# Altium integrated library conn-USB.IntLib: 68 symbols
Pins are listed as number, name and electrical type; pins without a type are passive.

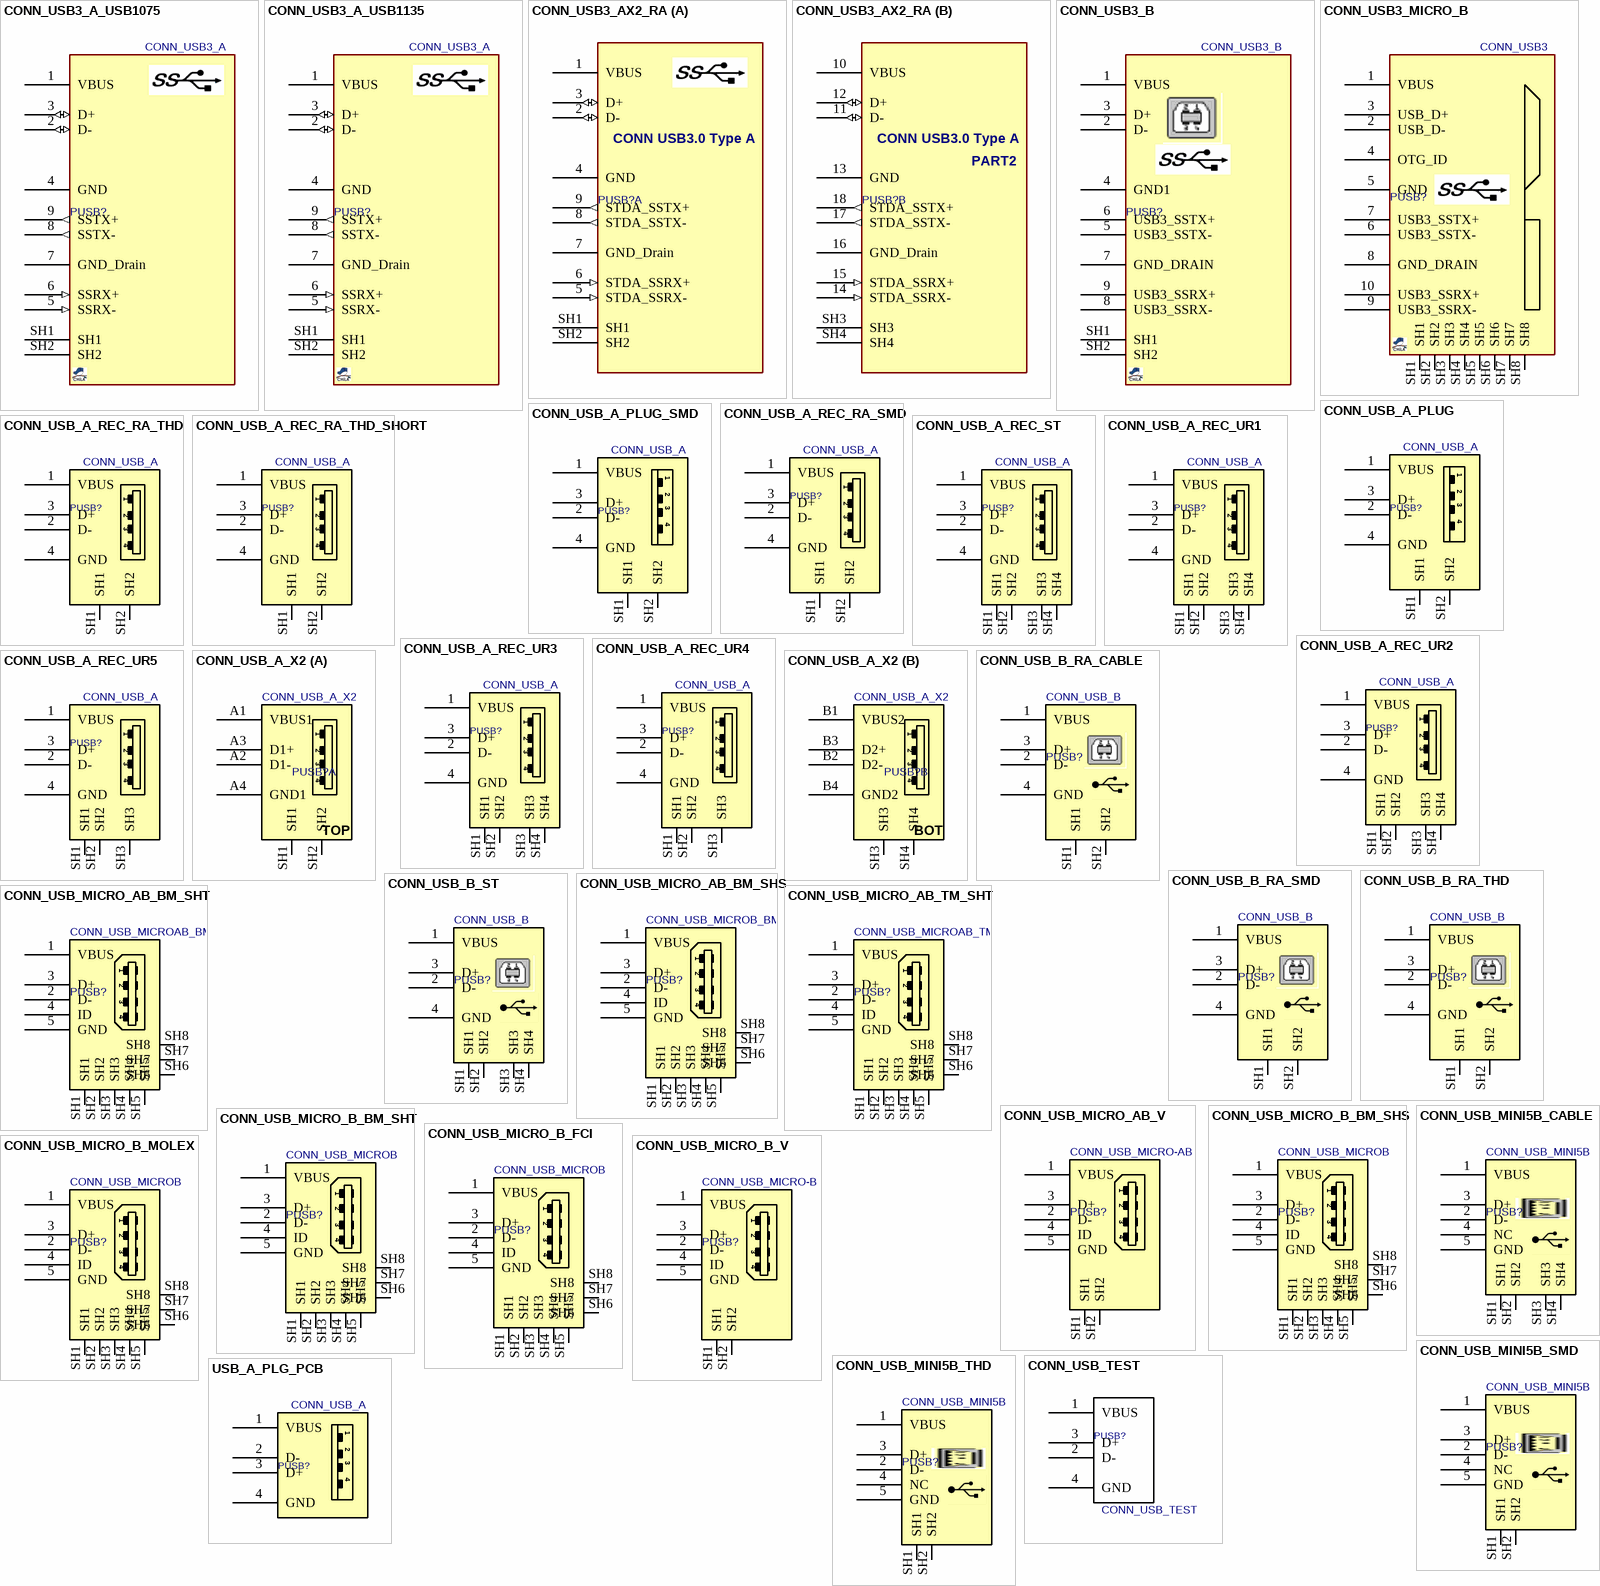
[diagram p0: symbols CONN_USB3_A_USB1075 to USB_A_PLG_PCB]

## CONN_USB3_A_USB1075
designator PUSB?, comment CONN_USB3_A
CONN, USB3, A type, R/A, THD; MANF_P#: USB1075; MANF: GCT; PARAM2: 5,000 cycles; PARAM: 1.8A, -55~+85°C; VALUE: CONN_USB3_A
footprint USB3_A_RA (USB 3.0 Receptecal, Type A, Top Mount, Through Hole, Horizontal)
pins: 1 VBUS (power), 2 D- (io), 3 D+ (io), 4 GND (power), 5 SSRX- (in), 6 SSRX+ (in), 7 GND_Drain (power), 8 SSTX- (out), 9 SSTX+ (out), SH1, SH2

## CONN_USB3_A_USB1135
designator PUSB?, comment CONN_USB3_A
CONN, USB3, A type, R/A, THD; MANF_P#: USB1135; MANF: GCT; PARAM2: 20,000 cycles; PARAM: 3A, -55~+85°C; VALUE: CONN_USB3_A
footprint USB3_A_RA (USB 3.0 Receptecal, Type A, Top Mount, Through Hole, Horizontal)
pins: 1 VBUS (power), 2 D- (io), 3 D+ (io), 4 GND (power), 5 SSRX- (in), 6 SSRX+ (in), 7 GND_Drain (power), 8 SSTX- (out), 9 SSTX+ (out), SH1, SH2

## CONN_USB3_AX2_RA
designator PUSB?, comment CONN_USB3_AX2  (value not drawn)
CONN, USB3, A, DUAL R/A, THD; MANF_P#: USB1100-30-A; MANF: GCT; PRICE: 1$; VALUE: CONN_USB3_AX2
footprint USB3_A_RA_X2 (USB 3.0 Dual Receptecal, Type A, Top Mount, Through Hole, Horizontal)
part A pins: 1 VBUS (power), 2 D- (io), 3 D+ (io), 4 GND (power), 5 STDA_SSRX- (in), 6 STDA_SSRX+ (in), 7 GND_Drain (power), 8 STDA_SSTX- (out), 9 STDA_SSTX+ (out), SH1, SH2
part B pins: 10 VBUS (power), 11 D- (io), 12 D+ (io), 13 GND (power), 14 STDA_SSRX- (in), 15 STDA_SSRX+ (in), 16 GND_Drain (power), 17 STDA_SSTX- (out), 18 STDA_SSTX+ (out), SH3, SH4
part A text: CONN USB3.0 Type A
part B text: CONN USB3.0 Type A; PART2

## CONN_USB3_B
designator PUSB?
CONN, USB3, B, R/A, THD; MANF_P#: UEB1112C-2AK1-4H; MANF: -; VALUE: CONN_USB3_B
footprint USB3_B_RA_THD (CONN, USB3.0, TYPE B, THD)
pins: 1 VBUS, 2 D-, 3 D+, 4 GND1, 5 USB3_SSTX-, 6 USB3_SSTX+, 7 GND_DRAIN, 8 USB3_SSRX-, 9 USB3_SSRX+, SH1, SH2

## CONN_USB3_MICRO_B
designator PUSB?, comment CONN_USB3
CONN, USB3, MICRO B, SMD; MANF_P#: GSB343133HR; MANF: Amphenol; MANF_P#2: CMS1811-010010 (HOSIDEN); VALUE: CONN_USB3
footprint USB3_MICRO_B (CONN, USB3, Micro B, CMS1811-010010 (HOSIDEN), GSB343133HR (AMPHENOL))
pins: 1 VBUS, 2 USB_D-, 3 USB_D+, 4 OTG_ID, 5 GND, 6 USB3_SSTX-, 7 USB3_SSTX+, 8 GND_DRAIN, 9 USB3_SSRX-, 10 USB3_SSRX+, SH1, SH2, SH3, SH4, SH5, SH6, SH7, SH8

## CONN_USB_A_PLUG
designator PUSB?, comment CONN_USB_A
CONN, USB, A, PLUG, THD; MANF: CUI; MANF_P#: UP2-AH-1-TH; PRICE: 0.5$; VALUE: CONN_USB_A
footprint USB_A_PLG_RA (CONN, USB, Type A, PLUG, Right Angle, SMD, THD)
pins: 1 VBUS, 2 D-, 3 D+, 4 GND, SH1, SH2

## CONN_USB_A_PLUG_SMD
designator PUSB?, comment CONN_USB_A
CONN, USB, A, PLUG, THD; MANF: MOLEX; MANF_P#: 48037-2200; PRICE: 1$; VALUE: CONN_USB_A
footprint USB_A_PLG_RA_SMD (Footprint not found)
pins: 1 VBUS, 2 D-, 3 D+, 4 GND, SH1, SH2

## CONN_USB_A_REC_RA_SMD
designator PUSB?, comment CONN_USB_A
CONN, USB, A, RECEPTACLE, R/A, SMD; VALUE: CONN_USB_A
footprint USB_A_REC_RA_SMD (CONN, USB A, Receptacle, RIGHT ANGLE, SMD)
pins: 1 VBUS, 2 D-, 3 D+, 4 GND, SH1, SH2

## CONN_USB_A_REC_RA_THD
designator PUSB?, comment CONN_USB_A
CONN, USB, A, RECEPTACLE, R/A, THD; VALUE: CONN_USB_A
footprint USB_A_REC_RA_THD (CONN, USB A, Receptacle, RIGHT ANGLE, THD)
pins: 1 VBUS, 2 D-, 3 D+, 4 GND, SH1, SH2

## CONN_USB_A_REC_RA_THD_SHORT
designator PUSB?, comment CONN_USB_A
CONN, USB, A, RECEPTACLE, R/A, THD; MANF_P#: USB1125; VALUE: CONN_USB_A
footprint USB_A_REC_RA_THD_S (Footprint not found)
pins: 1 VBUS, 2 D-, 3 D+, 4 GND, SH1, SH2

## CONN_USB_A_REC_ST
designator PUSB?, comment CONN_USB_A
CONN, USB, A, RECEPTACLE, STRAIGHT, THD; VALUE: CONN_USB_A
footprint USB_A_REC_ST (CONN, USB A, Receptacle, STRAIGHT, THD)
pins: 1 VBUS, 2 D-, 3 D+, 4 GND, SH1, SH2, SH3, SH4

## CONN_USB_A_REC_UR1
designator PUSB?, comment CONN_USB_A
CONN, USB, A, RECEPTACLE, R/A, THD, VERTICAL; MANF: Amphenol, Molex; MANF_P#: GSB19110KEU, 48204-0001; PRICE: 0.5$; VALUE: CONN_USB_A
footprint USB_A_REC_UR1 (CONN, USB A, upright, Right Angle, VERTICAL, THD)
pins: 1 VBUS, 2 D-, 3 D+, 4 GND, SH1, SH2, SH3, SH4

## CONN_USB_A_REC_UR2
designator PUSB?, comment CONN_USB_A
CONN, USB, A, RECEPTACLE, R/A, THD, VERTICAL; MANF: Amphenol, Kycon; MANF_P#: 73725-0110BLF, KUSBXHT-SLAS1N-O-HRF; PRICE: 0.5$; VALUE: CONN_USB_A
footprint USB_A_REC_UR2 (CONN, USB A, upright, Right Angle, VERTICAL, THD)
pins: 1 VBUS, 2 D-, 3 D+, 4 GND, SH1, SH2, SH3, SH4

## CONN_USB_A_REC_UR3
designator PUSB?, comment CONN_USB_A
CONN, USB, A, RECEPTACLE, R/A, THD, VERTICAL; MANF: MOLEX, China Forman; MANF_P#: 67329-8000, A0-9062-000SW; VALUE: CONN_USB_A
footprint USB_A_REC_UR3 (CONN, USB A, upright, Right Angle, VERTICAL, THD)
pins: 1 VBUS, 2 D-, 3 D+, 4 GND, SH1, SH2, SH3, SH4

## CONN_USB_A_REC_UR4
designator PUSB?, comment CONN_USB_A
CONN, USB, A, RECEPTACLE, R/A, THD, VERTICAL; MANF: Jing-Extension; MANF_P#: 906-561A1024D10200, 906-562A1014D10200; PRICE: 0.1$; VALUE: CONN_USB_A
footprint USB_A_REC_UR4 (CONN, USB A, upright, Right Angle, VERTICAL, THD)
pins: 1 VBUS, 2 D-, 3 D+, 4 GND, SH1, SH2, SH3

## CONN_USB_A_REC_UR5
designator PUSB?, comment CONN_USB_A
CONN, USB, A, RECEPTACLE, R/A, THD, VERTICAL; MANF: Jing-Extension; MANF_P#: 906-151B1016D10200; PRICE: 0.1$; VALUE: CONN_USB_A
footprint USB_A_REC_UR5 (CONN, USB A, upright, Right Angle, VERTICAL, THD)
pins: 1 VBUS, 2 D-, 3 D+, 4 GND, SH1, SH2, SH3

## CONN_USB_A_X2
designator PUSB?
CONN, USB, A, RECEPTACLE, R/A, THD, DUAL; MANF_P#: 5787617-1; MANF: TE Connectivity; VALUE: CONN_USB_A_X2
footprint USB_A_REC_RA_X2 (CONN, USB A, Right Angle, DUAL)
part A pins: A1 VBUS1, A2 D1-, A3 D1+, A4 GND1, SH1, SH2
part B pins: B1 VBUS2, B2 D2-, B3 D2+, B4 GND2, SH3, SH4
part A text: 1; 2; 3; 4; TOP
part B text: 1; 2; 3; 4; BOT

## CONN_USB_B_RA_CABLE
designator PUSB?, comment CONN_USB_B
CONN, USB, B, R/A, THD, CABLE; MANF_P#: -; MANF: -; VALUE: CONN_USB_B
footprint USB_B_RA_CABLE (CONN, USB B, Receptacle, RIGHT ANGLE, THD)
pins: 1 VBUS (power), 2 D-, 3 D+, 4 GND (power), SH1, SH2

## CONN_USB_B_RA_SMD
designator PUSB?, comment CONN_USB_B
CONN, USB, B, R/A, SMD; MANF_P#: KUSBEX-SMT-BS1N-BTR; MANF: Kycon; MANF_P#2: KUSBX-SMTBS1NBTR, KUSBX-SMTBS1NWTR; VALUE: CONN_USB_B
footprint USB_B_RA_SMD (CONN, USB B, Receptacle, RIGHT ANGLE, SMD)
pins: 1 VBUS (power), 2 D-, 3 D+, 4 GND (power), SH1, SH2

## CONN_USB_B_RA_THD
designator PUSB?, comment CONN_USB_B
CONN, USB, B, R/A, THD; MANF_P#: 292304-1; MANF: TE Connectivity; VALUE: CONN_USB_B
footprint USB_B_RA_THD (CONN, USB B, Receptacle, RIGHT ANGLE, THD)
pins: 1 VBUS (power), 2 D-, 3 D+, 4 GND (power), SH1, SH2

## CONN_USB_B_ST
designator PUSB?, comment CONN_USB_B
CONN, USB, B, STRAIGHT, THD; MANF_P#: -; MANF: -; VALUE: CONN_USB_B
footprint USB_B_ST (CONN, USB B, Receptacle, STRAIGHT, THD)
pins: 1 VBUS (power), 2 D-, 3 D+, 4 GND (power), SH1, SH2, SH3, SH4

## CONN_USB_MICRO_AB_BM_SHS
designator PUSB?, comment CONN_USB_MICROB_BM
CONN, USB, MICRO AB, R/A, SMD, BOTTOM MOUNT; MANF_P#: 1981584-1; MANF: TE; PARAM2: 30VAC; PARAM: 1.8A, -30~85oC; MANF_P#2: HIROSE ZX62-AB-5PA; PRICE: 0.75$; VALUE: CONN_USB_MICROB_BM
footprint USB_MICRO_AB_BM_SHS (CONN, USB Micro AB - Standard (Bottom mount), Shell THD, TE 1981584-1)
pins: 1 VBUS (power), 2 D-, 3 D+, 4 ID (power), 5 GND (power), SH1, SH2, SH3, SH4, SH5, SH6, SH7, SH8

## CONN_USB_MICRO_AB_BM_SHT
designator PUSB?, comment CONN_USB_MICROAB_BM
CONN, USB, MICRO AB, R/A, SMD, BOTTOM MOUNT; MANF_P#: 47589-0001; MANF: MOLEX; PARAM2: 30VAC; PARAM: 1.8A, -20~85oC; MANF_P#2: HIROSE ZX62D-AB-5P8; PRICE: 0.75$; VALUE: CONN_USB_MICROAB_BM
footprint USB_MICRO_AB_BM_SHT (CONN, USB Micro AB - Standard (Bottom mount), Shell THD, G610)
pins: 1 VBUS (power), 2 D-, 3 D+, 4 ID (power), 5 GND (power), SH1, SH2, SH3, SH4, SH5, SH6, SH7, SH8

## CONN_USB_MICRO_AB_TM_SHT
designator PUSB?, comment CONN_USB_MICROAB_TM
CONN, USB, MICRO AB, R/A, SMD, TOP MOUNT; MANF_P#: 47590-0001; MANF: MOLEX; PARAM2: 30VAC; PARAM: 1.8A, -20~85oC; PRICE: 0.75$; VALUE: CONN_USB_MICROAB_TM
footprint USB_MICRO_AB_TM_SHT (CONN, USB Micro AB, Top mount, Shell THT, molex 475900001)
pins: 1 VBUS (power), 2 D-, 3 D+, 4 ID (power), 5 GND (power), SH1, SH2, SH3, SH4, SH5, SH6, SH7, SH8

## CONN_USB_MICRO_AB_V
designator PUSB?, comment CONN_USB_MICRO-AB
CONN, USB, MICRO AB, Vertical; MANF_P#: USB3106-30-0230-A; MANF: MOLEX; PARAM: MICRO AB, Vertical; VALUE: CONN_USB_MICRO-AB
footprint USB_MICRO_AB_V (CONN, USB Micro AB Vertical)
pins: 1 VBUS (power), 2 D-, 3 D+, 4 ID (power), 5 GND (power), SH1, SH2

## CONN_USB_MICRO_B_BM_SHS
designator PUSB?, comment CONN_USB_MICROB
CONN, USB, MICRO B, R/A, SMD, BOTTOM MOUNT; MANF_P#: 47346-0001; MANF: Molex; MANF_P#2: HIROSE ZX62-AB-5PA; PARAM2: 30VAC; PARAM: 1.8A, -20~85oC; PRICE: 0.75$; VALUE: CONN_USB_MICROB
footprint USB_MICRO_B_BM_SHS (CONN, USB Micro B - Standard (Bottom mount), Shell SMD, 473460001, ZX62-AB-5PA)
pins: 1 VBUS (power), 2 D-, 3 D+, 4 ID (power), 5 GND (power), SH1, SH2, SH3, SH4, SH5, SH6, SH7, SH8

## CONN_USB_MICRO_B_BM_SHT
designator PUSB?, comment CONN_USB_MICROB
CONN, USB, MICRO B, R/A, SMD, BOTTOM MOUNT, SHT; MANF_P#: -; MANF: -; VALUE: CONN_USB_MICROB
footprint USB_MICRO_B_BM_SHT (CONN, USB Micro AB - Standard (Bottom mount), Shell SMT)
pins: 1 VBUS (power), 2 D-, 3 D+, 4 ID (power), 5 GND (power), SH1, SH2, SH3, SH4, SH5, SH6, SH7, SH8

## CONN_USB_MICRO_B_FCI
designator PUSB?, comment CONN_USB_MICROB
CONN, USB, MICRO B, R/A, SMD, BOTTOM MOUNT; MANF_P#: 10103593-0001LF; MANF: FCI; VALUE: CONN_USB_MICROB
footprint USB_MICRO_B_FCI (CONN, USB Micro AB)
pins: 1 VBUS (power), 2 D-, 3 D+, 4 ID (power), 5 GND (power), SH1, SH2, SH3, SH4, SH5, SH6, SH7, SH8

## CONN_USB_MICRO_B_MOLEX
designator PUSB?, comment CONN_USB_MICROB
CONN, USB, MICRO B, R/A, SMD, BOTTOM MOUNT; MANF_P#: 47491-0001; MANF: MOLEX; VALUE: CONN_USB_MICROB
footprint USB_MICRO_B_MOLEX (CONN, USB Micro AB)
pins: 1 VBUS (power), 2 D-, 3 D+, 4 ID (power), 5 GND (power), SH1, SH2, SH3, SH4, SH5, SH6, SH7, SH8

## CONN_USB_MICRO_B_V
designator PUSB?, comment CONN_USB_MICRO-B
CONN, USB, MICRO B, Vertical; MANF_P#: MICRO 180°Z, USB3131-30-0230-A; MANF: MOLEX; PARAM: MICRO B, Vertical; VALUE: CONN_USB_MICRO-B
footprint USB_MICRO_B_V (CONN, USB Micro B Vertical)
pins: 1 VBUS (power), 2 D-, 3 D+, 4 ID (power), 5 GND (power), SH1, SH2

## CONN_USB_MINI5B_CABLE
designator PUSB?, comment CONN_USB_MINI5B
CONN, USB, MINI 5 B, R/A, SMD; MANF_P#: UX60-MB-5ST; MANF: Hirose; MANF_P#2: 67503-1020 MOLEX; VALUE: CONN_USB_MINI5B
footprint USB_MINI_B5_CABLE (CONN, USB MINI B, 5PIN, RIGHT ANGLE, SMD)
pins: 1 VBUS (power), 2 D-, 3 D+, 4 NC (power), 5 GND (power), SH1, SH2, SH3, SH4

## CONN_USB_MINI5B_SMD
designator PUSB?, comment CONN_USB_MINI5B
CONN, USB, MINI 5 B, R/A, SMD; MANF_P#: UX60-MB-5ST; MANF: Hirose; MANF_P#2: 67503-1020 MOLEX; VALUE: CONN_USB_MINI5B
footprint USB_MINI_B5_SMD (CONN, USB MINI B, 5PIN, RIGHT ANGLE, SMD)
pins: 1 VBUS (power), 2 D-, 3 D+, 4 NC (power), 5 GND (power), SH1, SH2

## CONN_USB_MINI5B_THD
designator PUSB?, comment CONN_USB_MINI5B
CONN, USB, MINI 5 B, R/A, THD; MANF_P#: -; MANF: -; VALUE: CONN_USB_MINI5B
footprint USB_MINI_B5_THD (CONN, USB MINI B, 5PIN, RIGHT ANGLE, THD)
pins: 1 VBUS (power), 2 D-, 3 D+, 4 NC (power), 5 GND (power), SH1, SH2

## CONN_USB_TEST
designator PUSB?
CONN, USB, TEST; VALUE: CONN_USB_TEST
footprint USBTEST (CONN, USB A Receptacle RIGHT ANGLE)
pins: 1 VBUS, 2 D-, 3 D+, 4 GND

## USB_A_PLG_PCB
designator PUSB?, comment CONN_USB_A
CONN, USB, A, PCB; MANF: -; MANF_P#: CONN, USB, A, PCB; PRICE: 0.5$; VALUE: CONN_USB_A
footprint USB_A_PLG_PCB
pins: 1 VBUS, 2 D-, 3 D+, 4 GND


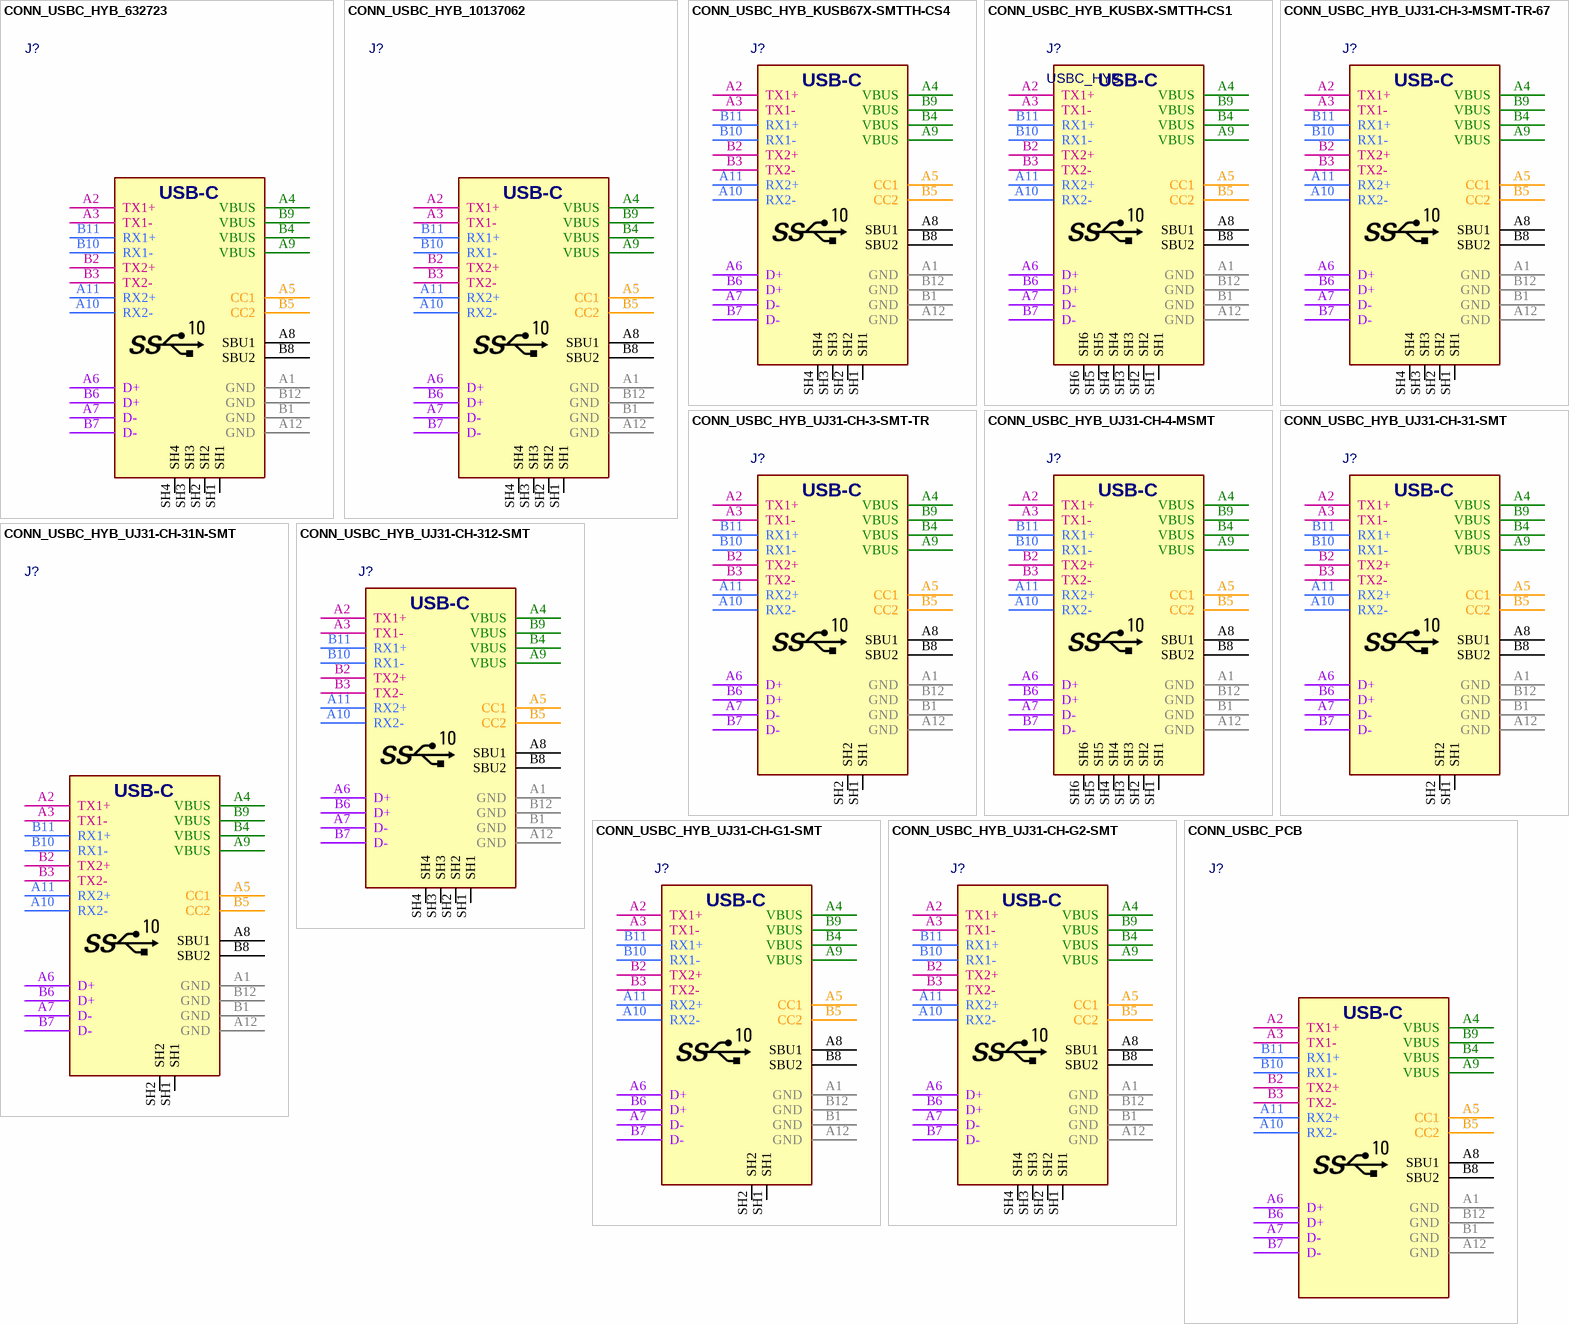
[diagram p1: symbols CONN_USBC_HYB_632723 to CONN_USBC_PCB]

## CONN_USBC_HYB_632723
designator J?, comment USB-C  (value not drawn)
CONN, USB, Type C (USB3.1), Right-Angle, HYBRID; MANF: WURTH; MANF_P#: 632723100011, 632723300011; PARAM: Type C, Right-Angle; PRICE: -; VALUE: USB-C
footprint USBC_HYB_632723 (CONN, USB, Type C, USB 3.1, Receptacle Horizontal, 632723)
pins: A1 GND, A2 TX1+, A3 TX1-, A4 VBUS, A5 CC1, A6 D+, A7 D-, A8 SBU1, A9 VBUS, A10 RX2-, A11 RX2+, A12 GND, B1 GND, B2 TX2+, B3 TX2-, B4 VBUS, B5 CC2, B6 D+, B7 D-, B8 SBU2, B9 VBUS, B10 RX1-, B11 RX1+, B12 GND, SH1, SH2, SH3, SH4

## CONN_USBC_HYB_10137062
designator J?, comment USB-C  (value not drawn)
CONN, USB, Type C, USB 3.1 Gen 1, Right-Angle, HYBRID; MANF: Amphenol; MANF_P#: 10137062-00021LF; PARAM: 5A; Price: None; Value: USB-C
footprint USBC_HYB_10137062 (CONN, USB, Type C, 10137062)
pins: A1 GND, A2 TX1+, A3 TX1-, A4 VBUS, A5 CC1, A6 D+, A7 D-, A8 SBU1, A9 VBUS, A10 RX2-, A11 RX2+, A12 GND, B1 GND, B2 TX2+, B3 TX2-, B4 VBUS, B5 CC2, B6 D+, B7 D-, B8 SBU2, B9 VBUS, B10 RX1-, B11 RX1+, B12 GND, SH1, SH2, SH3, SH4

## CONN_USBC_HYB_KUSB67X-SMTTH-CS4
designator J?, comment KUSB67X-SMTTH-CS4  (value not drawn)
CONN, USB, Type C, USB 3.2 Gen 2, Right-Angle, HYBRID; MANF: Kycon; PARAM: 5A, IP67; Price: 6$; MANF_P#: KUSB67X-SMTTH-CS4; Value: KUSB67X-SMTTH-CS4
footprint USBC_HYB_KUSB67XSMTTHCS4 (CONN, USB, Type C, KUSB67X-SMTTH-CS4)
pins: A1 GND, A2 TX1+, A3 TX1-, A4 VBUS, A5 CC1, A6 D+, A7 D-, A8 SBU1, A9 VBUS, A10 RX2-, A11 RX2+, A12 GND, B1 GND, B2 TX2+, B3 TX2-, B4 VBUS, B5 CC2, B6 D+, B7 D-, B8 SBU2, B9 VBUS, B10 RX1-, B11 RX1+, B12 GND, SH1, SH2, SH3, SH4
text: USB-C

## CONN_USBC_HYB_KUSBX-SMTTH-CS1
designator J?, comment USBC_HYB
CONN, USB, Type C, USB 3.1 Gen 2, Right-Angle, HYBRID; MANF: Kycon, CUI Devices; MANF_P#: KUSBX-SMTTH-CS1, UJ31-CH-314-SMT-TR; PARAM: 5A; Price: None; Value: USBC_HYB
footprint USBC_HYB_KUSBXSMTTHCS1 (CONN, USB, Type C, KUSBX-SMTTH-CS1, UJ31-CH-314-SMT)
pins: A1 GND, A2 TX1+, A3 TX1-, A4 VBUS, A5 CC1, A6 D+, A7 D-, A8 SBU1, A9 VBUS, A10 RX2-, A11 RX2+, A12 GND, B1 GND, B2 TX2+, B3 TX2-, B4 VBUS, B5 CC2, B6 D+, B7 D-, B8 SBU2, B9 VBUS, B10 RX1-, B11 RX1+, B12 GND, SH1, SH2, SH3, SH4, SH5, SH6
text: USB-C

## CONN_USBC_HYB_UJ31-CH-3-MSMT-TR-67
designator J?, comment UJ31-CH-3-MSMT-TR-67  (value not drawn)
CONN, USB, Type C, Gen 2, Right-Angle, Mid Mount, HYBRID, Waterproof; MANF: CUI Devices; PARAM: 5A; Price: None; MANF_P#: UJ31-CH-3-MSMT-TR-67; Value: UJ31-CH-3-MSMT-TR-67
footprint USBC_HYB_UJ31CH3MSMT67 (CONN, USB, Type C, Gen 2, Right-Angle, Mid Mount, HYBRID, Waterproof, UJ31-CH-3-MSMT-TR-67)
pins: A1 GND, A2 TX1+, A3 TX1-, A4 VBUS, A5 CC1, A6 D+, A7 D-, A8 SBU1, A9 VBUS, A10 RX2-, A11 RX2+, A12 GND, B1 GND, B2 TX2+, B3 TX2-, B4 VBUS, B5 CC2, B6 D+, B7 D-, B8 SBU2, B9 VBUS, B10 RX1-, B11 RX1+, B12 GND, SH1, SH2, SH3, SH4
text: USB-C

## CONN_USBC_HYB_UJ31-CH-3-SMT-TR
designator J?, comment UJ31-CH-3-SMT  (value not drawn)
CONN, USB, Type C, USB 3.1 Gen 2, Right-Angle, HYBRID; MANF: CUI Devices; MANF_P#: UJ31-CH-3-SMT-TR; PARAM: 5A; Price: None; Value: UJ31-CH-3-SMT
footprint USBC_HYB_UJ31CH3SMT (CONN, USB, Type C, USB 3.1 Gen 2, Right-Angle, HYBRID, UJ31-CH-3-SMT)
pins: A1 GND, A2 TX1+, A3 TX1-, A4 VBUS, A5 CC1, A6 D+, A7 D-, A8 SBU1, A9 VBUS, A10 RX2-, A11 RX2+, A12 GND, B1 GND, B2 TX2+, B3 TX2-, B4 VBUS, B5 CC2, B6 D+, B7 D-, B8 SBU2, B9 VBUS, B10 RX1-, B11 RX1+, B12 GND, SH1, SH2
text: USB-C

## CONN_USBC_HYB_UJ31-CH-4-MSMT
designator J?, comment UJ31-CH-4-MSMT  (value not drawn)
CONN, USB, Type C, USB 3.1 Gen 2, Right-Angle, Mid Mount, HYBRID; MANF: CUI Devices; MANF_P#: UJ31-CH-4-MSMT-TR; PARAM: 5A; Price: None; Value: UJ31-CH-4-MSMT
footprint USBC_HYB_UJ31CH4MSMT (CONN, USB, Type C, UJ31-CH-4-MSMT)
pins: A1 GND, A2 TX1+, A3 TX1-, A4 VBUS, A5 CC1, A6 D+, A7 D-, A8 SBU1, A9 VBUS, A10 RX2-, A11 RX2+, A12 GND, B1 GND, B2 TX2+, B3 TX2-, B4 VBUS, B5 CC2, B6 D+, B7 D-, B8 SBU2, B9 VBUS, B10 RX1-, B11 RX1+, B12 GND, SH1, SH2, SH3, SH4, SH5, SH6
text: USB-C

## CONN_USBC_HYB_UJ31-CH-31-SMT
designator J?, comment UJ31-CH-31-SMT  (value not drawn)
CONN, USB, Type C, USB 3.1 Gen 2, Right-Angle, Mid Mount, HYBRID; MANF: CUI Devices; MANF_P#: UJ31-CH-31-SMT-TR; PARAM: 5A; Price: None; VALUE: UJ31-CH-31-SMT
footprint USBC_HYB_UJ31CH31 (CONN, USB, Type C, UJ31-CH-31N-SMT, UJ31-CH-31-SMT)
pins: A1 GND, A2 TX1+, A3 TX1-, A4 VBUS, A5 CC1, A6 D+, A7 D-, A8 SBU1, A9 VBUS, A10 RX2-, A11 RX2+, A12 GND, B1 GND, B2 TX2+, B3 TX2-, B4 VBUS, B5 CC2, B6 D+, B7 D-, B8 SBU2, B9 VBUS, B10 RX1-, B11 RX1+, B12 GND, SH1, SH2
text: USB-C

## CONN_USBC_HYB_UJ31-CH-31N-SMT
designator J?, comment UJ31-CH-31N-SMT  (value not drawn)
CONN, USB, Type C, USB 3.1 Gen 2, Right-Angle, HYBRID; MANF: CUI Devices; MANF_P#: UJ31-CH-31N-SMT-TR; Value: UJ31-CH-31N-SMT
footprint USBC_HYB_UJ31CH31 (CONN, USB, Type C, UJ31-CH-31N-SMT, UJ31-CH-31-SMT)
pins: A1 GND, A2 TX1+, A3 TX1-, A4 VBUS, A5 CC1, A6 D+, A7 D-, A8 SBU1, A9 VBUS, A10 RX2-, A11 RX2+, A12 GND, B1 GND, B2 TX2+, B3 TX2-, B4 VBUS, B5 CC2, B6 D+, B7 D-, B8 SBU2, B9 VBUS, B10 RX1-, B11 RX1+, B12 GND, SH1, SH2
text: USB-C

## CONN_USBC_HYB_UJ31-CH-312-SMT
designator J?, comment UJ31-CH-312-SMT  (value not drawn)
CONN, USB, Type C, USB 3.1 Gen 2, Right-Angle, HYBRID; MANF: CUI Devices; MANF_P#: UJ31-CH-312-SMT-TR; PARAM: 5A; Price: None; Value: UJ31-CH-312-SMT
footprint USBC_HYB_UJ31CH312SMT (CONN, USB, Type C, UJ31-CH-312-SMT)
pins: A1 GND, A2 TX1+, A3 TX1-, A4 VBUS, A5 CC1, A6 D+, A7 D-, A8 SBU1, A9 VBUS, A10 RX2-, A11 RX2+, A12 GND, B1 GND, B2 TX2+, B3 TX2-, B4 VBUS, B5 CC2, B6 D+, B7 D-, B8 SBU2, B9 VBUS, B10 RX1-, B11 RX1+, B12 GND, SH1, SH2, SH3, SH4
text: USB-C

## CONN_USBC_HYB_UJ31-CH-G1-SMT
designator J?, comment UJ31-CH-G1-SMT  (value not drawn)
CONN, USB, Type C, USB 3.1 Gen 2, Right-Angle, HYBRID; MANF: CUI Devices; MANF_P#: UJ31-CH-G1-SMT-TR; PARAM: 5A; Price: None; Value: UJ31-CH-G1-SMT
footprint USBC_HYB_UJ31CHG1SMT (CONN, USB, Type C, UJ31-CH-G1-SMT)
pins: A1 GND, A2 TX1+, A3 TX1-, A4 VBUS, A5 CC1, A6 D+, A7 D-, A8 SBU1, A9 VBUS, A10 RX2-, A11 RX2+, A12 GND, B1 GND, B2 TX2+, B3 TX2-, B4 VBUS, B5 CC2, B6 D+, B7 D-, B8 SBU2, B9 VBUS, B10 RX1-, B11 RX1+, B12 GND, SH1, SH2
text: USB-C

## CONN_USBC_HYB_UJ31-CH-G2-SMT
designator J?, comment UJ31-CH-G2-SMT  (value not drawn)
CONN, USB, Type C, USB 3.1 Gen 2, Right-Angle, HYBRID; MANF: CUI Devices; MANF_P#: UJ31-CH-G2-SMT-TR; PARAM: 5A; Price: None; Value: UJ31-CH-G2-SMT
footprint USBC_HYB_UJ31CHG2SMT (CONN, USB, Type C, UJ31-CH-G2-SMT)
pins: A1 GND, A2 TX1+, A3 TX1-, A4 VBUS, A5 CC1, A6 D+, A7 D-, A8 SBU1, A9 VBUS, A10 RX2-, A11 RX2+, A12 GND, B1 GND, B2 TX2+, B3 TX2-, B4 VBUS, B5 CC2, B6 D+, B7 D-, B8 SBU2, B9 VBUS, B10 RX1-, B11 RX1+, B12 GND, SH1, SH2, SH3, SH4
text: USB-C

## CONN_USBC_PCB
designator J?, comment USB-C  (value not drawn)
CONN, USB, Type C (USB3.1), Direct on PCB; MANF: WURTH; PARAM: Type C, Right-Angle; PRICE: -; VALUE: USB-C
footprint USBC_PCB (CONN, USB C , PCB, pcb thickness must be 0.6mm)
pins: A1 GND, A2 TX1+, A3 TX1-, A4 VBUS, A5 CC1, A6 D+, A7 D-, A8 SBU1, A9 VBUS, A10 RX2-, A11 RX2+, A12 GND, B1 GND, B2 TX2+, B3 TX2-, B4 VBUS, B5 CC2, B6 D+, B7 D-, B8 SBU2, B9 VBUS, B10 RX1-, B11 RX1+, B12 GND

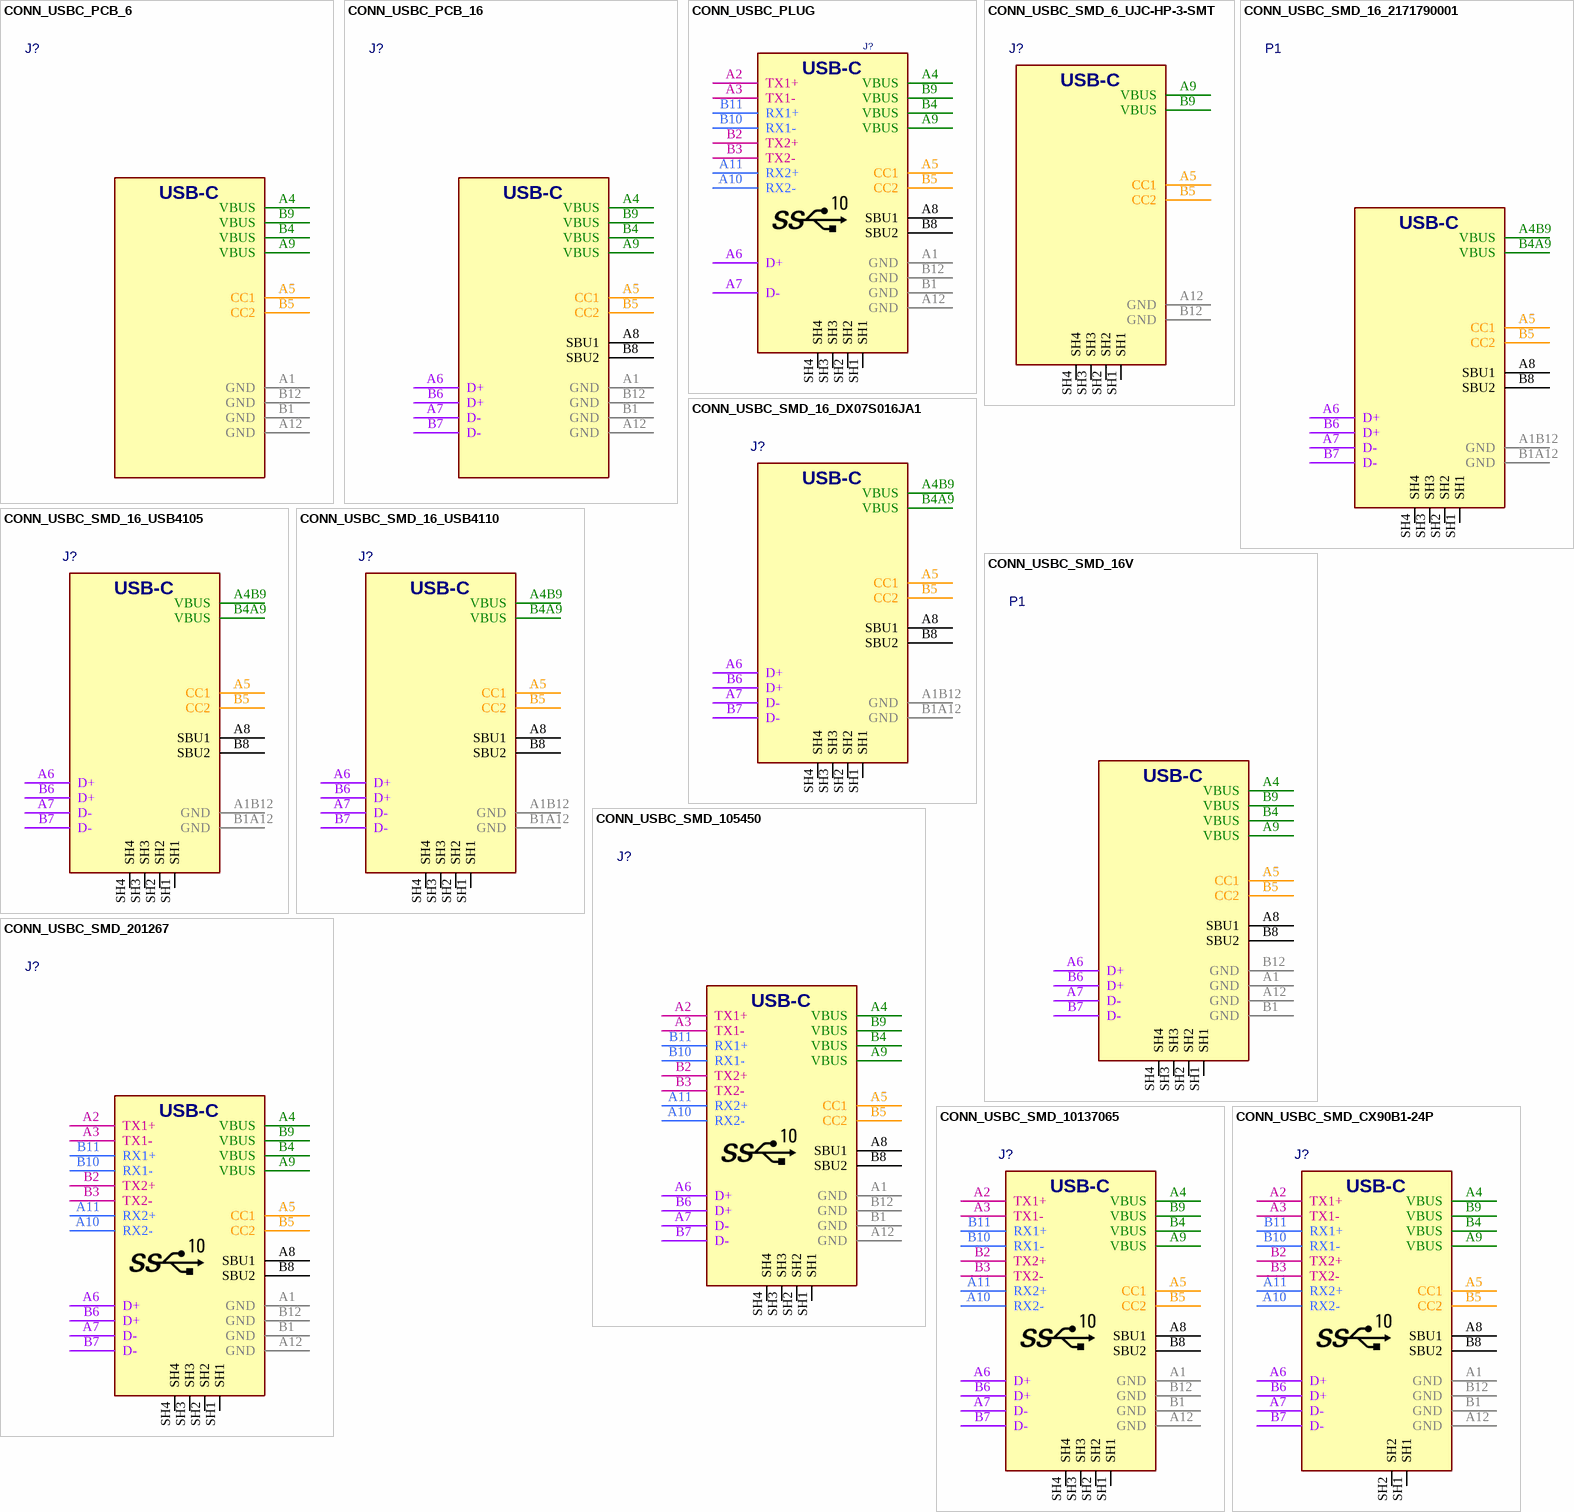
[diagram p2: symbols CONN_USBC_PCB_6 to CONN_USBC_SMD_CX90B1-24P]

## CONN_USBC_PCB_6
designator J?, comment USB-C  (value not drawn)
CONN, USB, Type C (USB3.1), Direct on PCB; MANF: WURTH; PARAM: Type C, Right-Angle; PRICE: -; VALUE: USB-C
footprint USBC_PCB_6 (CONN, USB C , PCB, pcb thickness must be 0.6mm)
pins: A1 GND, A4 VBUS, A5 CC1, A9 VBUS, A12 GND, B1 GND, B4 VBUS, B5 CC2, B9 VBUS, B12 GND

## CONN_USBC_PCB_16
designator J?, comment USB-C  (value not drawn)
CONN, USB, Type C (USB3.1), Direct on PCB; MANF: WURTH; PARAM: Type C, Right-Angle; PRICE: -; VALUE: USB-C
footprint USBC_PCB_16 (CONN, USB C , PCB, pcb thickness must be 0.6mm)
pins: A1 GND, A4 VBUS, A5 CC1, A6 D+, A7 D-, A8 SBU1, A9 VBUS, A12 GND, B1 GND, B4 VBUS, B5 CC2, B6 D+, B7 D-, B8 SBU2, B9 VBUS, B12 GND

## CONN_USBC_PLUG
designator J?, comment USB-C  (value not drawn)
CONN, USB, Type C (USB3.1), PLUG SMD; MANF: WURTH; MANF_P#: 632712000011; PARAM: Type C, Right-Angle; PRICE: -; VALUE: USB-C
footprint USBC_PLUG (CONN, USB C , PLUG)
pins: A1 GND, A2 TX1+, A3 TX1-, A4 VBUS, A5 CC1, A6 D+, A7 D-, A8 SBU1, A9 VBUS, A10 RX2-, A11 RX2+, A12 GND, B1 GND, B2 TX2+, B3 TX2-, B4 VBUS, B5 CC2, B8 SBU2, B9 VBUS, B10 RX1-, B11 RX1+, B12 GND, SH1, SH2, SH3, SH4

## CONN_USBC_SMD_6_UJC-HP-3-SMT
designator J?, comment UJC-HP-3-SMT  (value not drawn)
CONN, USB, Type C (USB 3.1), Right-Angle, SMD; MANF: CUI Devices; PARAM2: 20v; PARAM: Power Only, 3A; Price: 0.8$; MANF_P#: UJC-HP-3-SMT; Value: UJC-HP-3-SMT
footprint USBC_SMD_6_UJCHP3SMT (CONN, USB, Type C, UJC-HP-3-SMT, popular*)
pins: A5 CC1, A9 VBUS, A12 GND, B5 CC2, B9 VBUS, B12 GND, SH1, SH2, SH3, SH4
text: USB-C

## CONN_USBC_SMD_16_2171790001
designator P1, comment USBC_SMD_16  (value not drawn)
CONN, USB, Type C, USB 2.0, Right-Angle, SMD; MANF: MOLEX; MANF_P#: 2171790001; PARAM: 5A; Price: 1.5$; Value: USBC_SMD_16
footprint USBC_SMD_16_2171790001 (CONN, USB, Type C, 2171790001)
pins: A1B12 GND, A4B9 VBUS, A5 CC1, A6 D+, A7 D-, A8 SBU1, B1A12 GND, B4A9 VBUS, B5 CC2, B6 D+, B7 D-, B8 SBU2, SH1, SH2, SH3, SH4
text: USB-C

## CONN_USBC_SMD_16_DX07S016JA1
designator J?, comment DX07S016JA1  (value not drawn)
CONN, USB, Type C, USB 2.0, Right-Angle, SMD; MANF: JAE; MANF_P#: DX07S016JA1R1500; PARAM: 5A; Price: 1.5$; Value: DX07S016JA1
footprint USBC_SMD_16_DX07S016JA1 (CONN, USB, Type C, DX07S016JA1, popular*)
pins: A1B12 GND, A4B9 VBUS, A5 CC1, A6 D+, A7 D-, A8 SBU1, B1A12 GND, B4A9 VBUS, B5 CC2, B6 D+, B7 D-, B8 SBU2, SH1, SH2, SH3, SH4
text: USB-C

## CONN_USBC_SMD_16_USB4105
designator J?, comment USB4105  (value not drawn)
CONN, USB, Type C, USB 2.0, Right-Angle, SMD; MANF: GCT; MANF_P#: USB4105-GF-A; PARAM: 5A; Price: 1.5$; Value: USB4105
footprint USBC_SMD_16_USB4105 (CONN, USB, Type C, USB4105, popular*)
pins: A1B12 GND, A4B9 VBUS, A5 CC1, A6 D+, A7 D-, A8 SBU1, B1A12 GND, B4A9 VBUS, B5 CC2, B6 D+, B7 D-, B8 SBU2, SH1, SH2, SH3, SH4
text: USB-C

## CONN_USBC_SMD_16_USB4110
designator J?, comment USB4110  (value not drawn)
CONN, USB, Type C, USB 2.0, Right-Angle, SMD; MANF: GCT; MANF_P#: USB4110-GF-A; PARAM: 5A; Price: 1.5$; Value: USB4110
footprint USBC_SMD_16_USB4110 (CONN, USB, Type C, USB4110)
pins: A1B12 GND, A4B9 VBUS, A5 CC1, A6 D+, A7 D-, A8 SBU1, B1A12 GND, B4A9 VBUS, B5 CC2, B6 D+, B7 D-, B8 SBU2, SH1, SH2, SH3, SH4
text: USB-C

## CONN_USBC_SMD_16V
designator P1, comment USBC_THD_16V  (value not drawn)
CONN, USB, Type C, USB 2.0, Vertical, SMD; MANF: Samesky/CUI; MANF_P#: UJ20-C-V-C-1-SMT, UJ20-C-V-G-SMT-P16, UJ20-C-V-G-SMT-3-P16, USB4120, TYPE-C 16PLT-H10.0; PARAM: 5A; Price: 1$; Value: USBC_THD_16V
footprint USBC_SMD_16V (CONN, USB, Type C, SMD Vertical)
pins: A1 GND, A4 VBUS, A5 CC1, A6 D+, A7 D-, A8 SBU1, A9 VBUS, A12 GND, B1 GND, B4 VBUS, B5 CC2, B6 D+, B7 D-, B8 SBU2, B9 VBUS, B12 GND, SH1, SH2, SH3, SH4
text: USB-C

## CONN_USBC_SMD_105450
designator J?, comment USB-C  (value not drawn)
CONN, USB, Type C (USB3.1), Right-Angle, SMD; MANF: MOLEX; MANF_P#: 105450-0101; PARAM: Type C, Right-Angle; PRICE: 2$; VALUE: USB-C
footprint USBC_SMD_105450 (USB 3.1 Type C Receptacle Horizontal, SMD)
pins: A1 GND, A2 TX1+, A3 TX1-, A4 VBUS, A5 CC1, A6 D+, A7 D-, A8 SBU1, A9 VBUS, A10 RX2-, A11 RX2+, A12 GND, B1 GND, B2 TX2+, B3 TX2-, B4 VBUS, B5 CC2, B6 D+, B7 D-, B8 SBU2, B9 VBUS, B10 RX1-, B11 RX1+, B12 GND, SH1, SH2, SH3, SH4

## CONN_USBC_SMD_201267
designator J?, comment USB-C  (value not drawn)
CONN, USB, Type C (USB3.1), Right-Angle, SMD; MANF: MOLEX; MANF_P#: 2012670005-000; PARAM: Type C, Right-Angle; PRICE: 2$; VALUE: USB-C
footprint USBC_SMD_201267 (CONN, USB, Type C, SMD)
pins: A1 GND, A2 TX1+, A3 TX1-, A4 VBUS, A5 CC1, A6 D+, A7 D-, A8 SBU1, A9 VBUS, A10 RX2-, A11 RX2+, A12 GND, B1 GND, B2 TX2+, B3 TX2-, B4 VBUS, B5 CC2, B6 D+, B7 D-, B8 SBU2, B9 VBUS, B10 RX1-, B11 RX1+, B12 GND, SH1, SH2, SH3, SH4

## CONN_USBC_SMD_10137065
designator J?, comment 10137065  (value not drawn)
CONN, USB, Type C, USB 3.1 Gen 1, Right-Angle, SMD; MANF: Amphenol; MANF_P#: 10137065-00021LF; PARAM: 5A; Price: None; Value: 10137065
footprint USBC_HYB_UJ31CHG2SMT (CONN, USB, Type C, UJ31-CH-G2-SMT)
pins: A1 GND, A2 TX1+, A3 TX1-, A4 VBUS, A5 CC1, A6 D+, A7 D-, A8 SBU1, A9 VBUS, A10 RX2-, A11 RX2+, A12 GND, B1 GND, B2 TX2+, B3 TX2-, B4 VBUS, B5 CC2, B6 D+, B7 D-, B8 SBU2, B9 VBUS, B10 RX1-, B11 RX1+, B12 GND, SH1, SH2, SH3, SH4
text: USB-C

## CONN_USBC_SMD_CX90B1-24P
designator J?, comment USBC_E412A  (value not drawn)
CONN, USB, Type C, USB 3.1 Gen 2, Right-Angle, SMD; MANF: Hirose; MANF_P#: CX90B1-24P; PARAM: 5A; Price: 2.5$; Value: USBC_E412A
footprint USBC_SMD_E412A (CONN, USB, Type C, SMD, 12401899E412A)
pins: A1 GND, A2 TX1+, A3 TX1-, A4 VBUS, A5 CC1, A6 D+, A7 D-, A8 SBU1, A9 VBUS, A10 RX2-, A11 RX2+, A12 GND, B1 GND, B2 TX2+, B3 TX2-, B4 VBUS, B5 CC2, B6 D+, B7 D-, B8 SBU2, B9 VBUS, B10 RX1-, B11 RX1+, B12 GND, SH1, SH2
text: USB-C

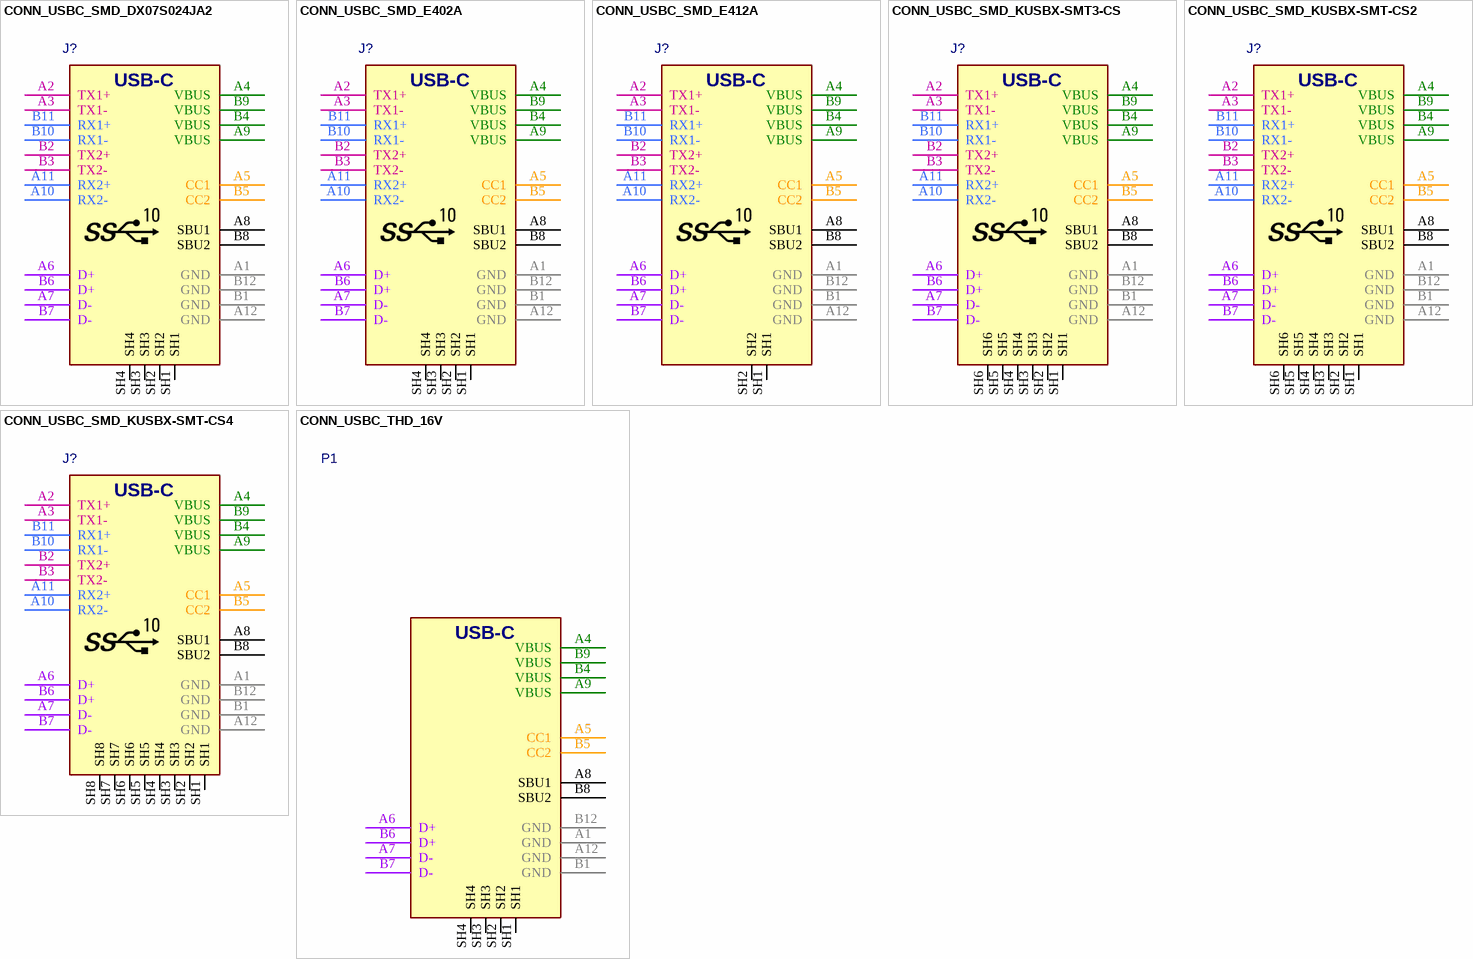
[diagram p3: symbols CONN_USBC_SMD_DX07S024JA2 to CONN_USBC_THD_16V]

## CONN_USBC_SMD_DX07S024JA2
designator J?, comment DX07S024JA2  (value not drawn)
CONN, USB, Type C, USB 3.2, Right-Angle, SMD; MANF: Amphenol; MANF_P#: DX07S024JA2R1200; PARAM: 5A; Price: 2$; Value: DX07S024JA2
footprint USBC_SMD_DX07S024JA2 (CONN, USB, Type C, DX07S024JA2)
pins: A1 GND, A2 TX1+, A3 TX1-, A4 VBUS, A5 CC1, A6 D+, A7 D-, A8 SBU1, A9 VBUS, A10 RX2-, A11 RX2+, A12 GND, B1 GND, B2 TX2+, B3 TX2-, B4 VBUS, B5 CC2, B6 D+, B7 D-, B8 SBU2, B9 VBUS, B10 RX1-, B11 RX1+, B12 GND, SH1, SH2, SH3, SH4
text: USB-C

## CONN_USBC_SMD_E402A
designator J?, comment USBC_E402A  (value not drawn)
CONN, USB, Type C, USB 3.1 Gen 2, Right-Angle, SMD; MANF: Amphenol; MANF_P#: 12401598E4#2A, 12401610E4#2A, 12401832E402A; PARAM: 5A; Price: 1.7$; Value: USBC_E402A
footprint USBC_SMD_E402A (CONN, USB, Type C, SMD, 12401598E4#2A, 12401610E4#2A)
pins: A1 GND, A2 TX1+, A3 TX1-, A4 VBUS, A5 CC1, A6 D+, A7 D-, A8 SBU1, A9 VBUS, A10 RX2-, A11 RX2+, A12 GND, B1 GND, B2 TX2+, B3 TX2-, B4 VBUS, B5 CC2, B6 D+, B7 D-, B8 SBU2, B9 VBUS, B10 RX1-, B11 RX1+, B12 GND, SH1, SH2, SH3, SH4
text: USB-C

## CONN_USBC_SMD_E412A
designator J?, comment USBC_E412A  (value not drawn)
CONN, USB, Type C, USB 3.1 Gen 2, Right-Angle, SMD; MANF: Amphenol; MANF_P#: 12401849E412A, 12401899E412A; PARAM: 5A; Price: 1.7$; Value: USBC_E412A
footprint USBC_SMD_E412A (CONN, USB, Type C, SMD, 12401899E412A)
pins: A1 GND, A2 TX1+, A3 TX1-, A4 VBUS, A5 CC1, A6 D+, A7 D-, A8 SBU1, A9 VBUS, A10 RX2-, A11 RX2+, A12 GND, B1 GND, B2 TX2+, B3 TX2-, B4 VBUS, B5 CC2, B6 D+, B7 D-, B8 SBU2, B9 VBUS, B10 RX1-, B11 RX1+, B12 GND, SH1, SH2
text: USB-C

## CONN_USBC_SMD_KUSBX-SMT3-CS
designator J?, comment KUSBX-SMT3-CS  (value not drawn)
CONN, USB, Type C, USB 3.1 Gen 2, Right-Angle, SMD; MANF: Kycon; PARAM: 5A; Price: 2.7$; MANF_P#: KUSBX-SMT3-CS; Value: KUSBX-SMT3-CS
footprint USBC_SMD_KUSBXSMT3CS (CONN, USB, Type C, KUSBX-SMT3-CS)
pins: A1 GND, A2 TX1+, A3 TX1-, A4 VBUS, A5 CC1, A6 D+, A7 D-, A8 SBU1, A9 VBUS, A10 RX2-, A11 RX2+, A12 GND, B1 GND, B2 TX2+, B3 TX2-, B4 VBUS, B5 CC2, B6 D+, B7 D-, B8 SBU2, B9 VBUS, B10 RX1-, B11 RX1+, B12 GND, SH1, SH2, SH3, SH4, SH5, SH6
text: USB-C

## CONN_USBC_SMD_KUSBX-SMT-CS2
designator J?, comment KUSBX-SMT-CS2  (value not drawn)
CONN, USB, Type C, USB 3.1 Gen 2, Right-Angle, SMD; MANF: Kycon; PARAM: 5A; Price: 2.7$; MANF_P#: KUSBX-SMT-CS2; Value: KUSBX-SMT-CS2
footprint USBC_SMD_KUSBXSMTCS2 (CONN, USB, Type C, KUSBX-SMT-CS2)
pins: A1 GND, A2 TX1+, A3 TX1-, A4 VBUS, A5 CC1, A6 D+, A7 D-, A8 SBU1, A9 VBUS, A10 RX2-, A11 RX2+, A12 GND, B1 GND, B2 TX2+, B3 TX2-, B4 VBUS, B5 CC2, B6 D+, B7 D-, B8 SBU2, B9 VBUS, B10 RX1-, B11 RX1+, B12 GND, SH1, SH2, SH3, SH4, SH5, SH6
text: USB-C

## CONN_USBC_SMD_KUSBX-SMT-CS4
designator J?, comment KUSBX-SMT-CS4  (value not drawn)
CONN, USB, Type C, USB 3.1 Gen 2, Right-Angle, SMD; MANF: Kycon; PARAM: 5A; Price: 2.7$; MANF_P#: KUSBX-SMT-CS4; Value: KUSBX-SMT-CS4
footprint USBC_SMD_KUSBXSMTCS4 (CONN, USB, Type C, KUSBX-SMT-CS4)
pins: A1 GND, A2 TX1+, A3 TX1-, A4 VBUS, A5 CC1, A6 D+, A7 D-, A8 SBU1, A9 VBUS, A10 RX2-, A11 RX2+, A12 GND, B1 GND, B2 TX2+, B3 TX2-, B4 VBUS, B5 CC2, B6 D+, B7 D-, B8 SBU2, B9 VBUS, B10 RX1-, B11 RX1+, B12 GND, SH1, SH2, SH3, SH4, SH5, SH6, SH7, SH8
text: USB-C

## CONN_USBC_THD_16V
designator P1, comment USBC_THD_16V  (value not drawn)
CONN, USB, Type C, USB 2.0, Vertical, SMD; MANF: Samesky/CUI; MANF_P#: UJ20-C-V-C-3-SMT, TYPE-C 16PLC-H10.0; PARAM: 5A; Price: 1$; Value: USBC_THD_16V
footprint USBC_THD_16V (CONN, USB, Type C, THD Vertical)
pins: A1 GND, A4 VBUS, A5 CC1, A6 D+, A7 D-, A8 SBU1, A9 VBUS, A12 GND, B1 GND, B4 VBUS, B5 CC2, B6 D+, B7 D-, B8 SBU2, B9 VBUS, B12 GND, SH1, SH2, SH3, SH4
text: USB-C